# Altium schematic symbol library PCB_PTUMotorDriver.SCHLIB: 144 symbols (part 1 of 3)
Pins are listed as number, name and electrical type; pins without a type are passive.

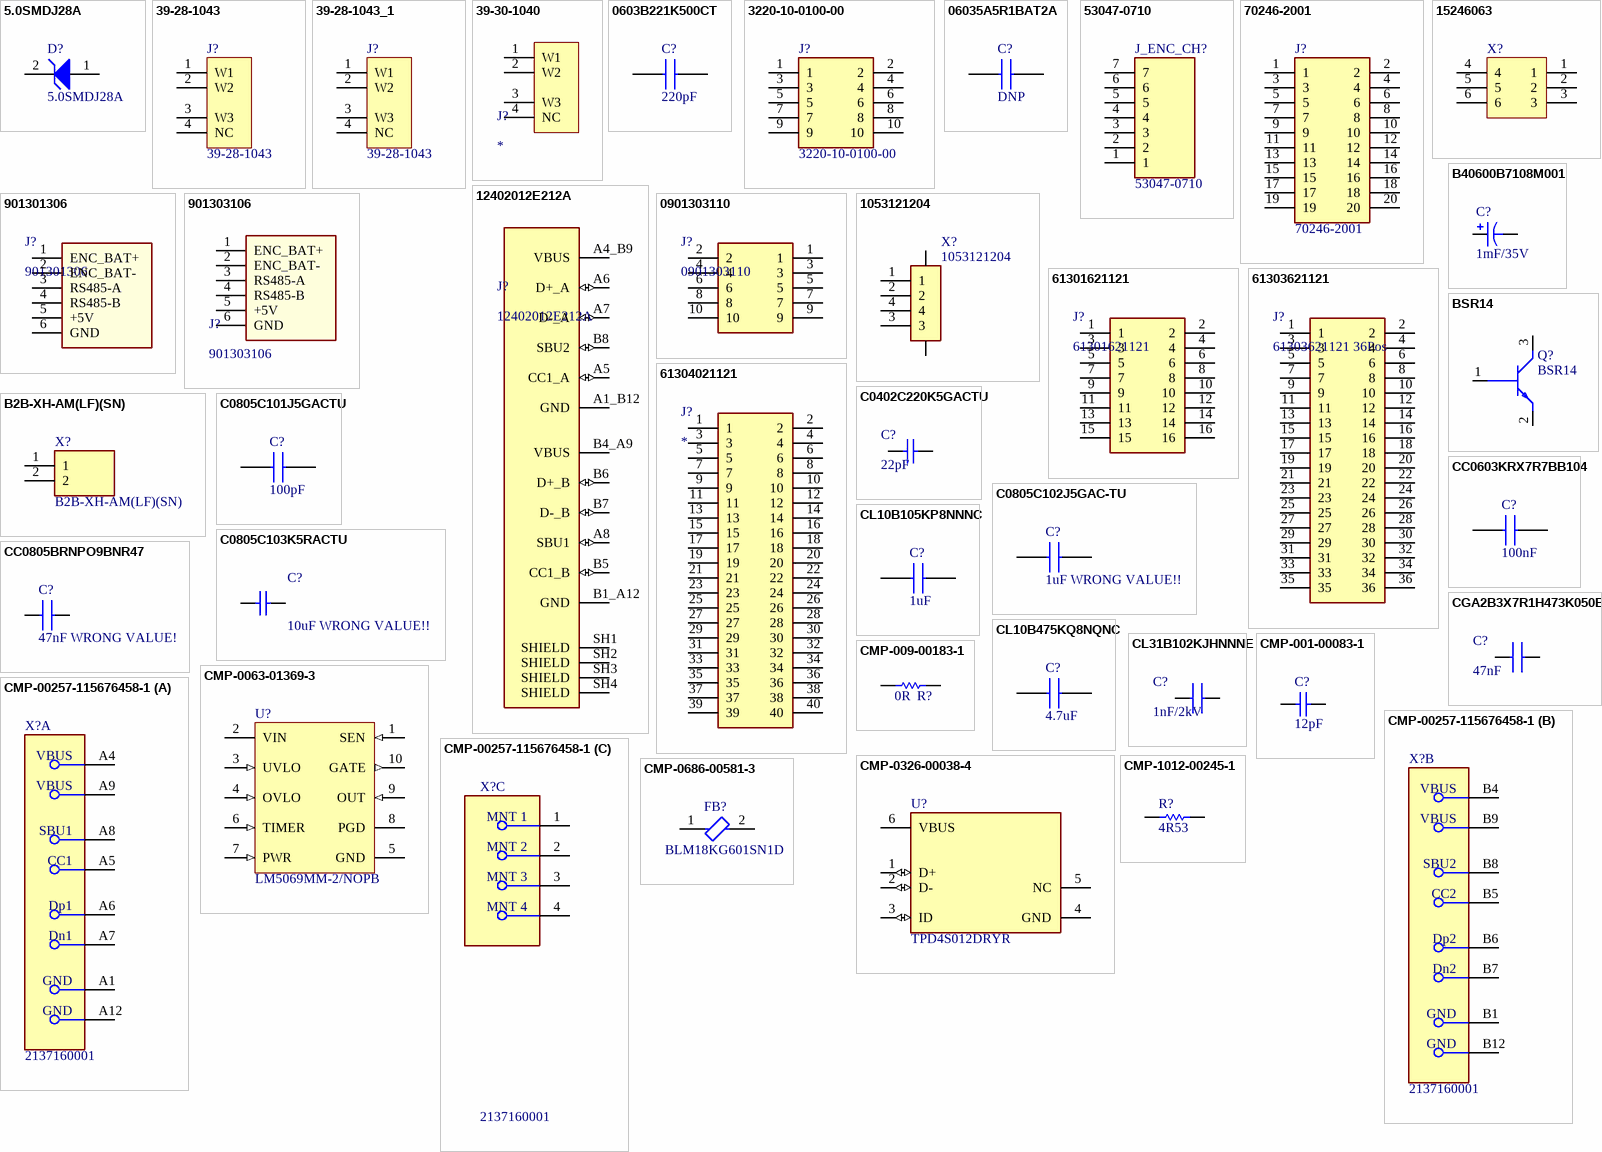
[diagram p0: symbols 5.0SMDJ28A to CMP-1012-00245-1]

## 5.0SMDJ28A
designator D?
5.0SMDJ Series 5 kW 28 V Uni-Directional Surface Mount TVS Diode - DO-214AB; Manufacturer: Littelfuse; ComponentLink1URL: https://datasheet.ciiva.com/15143/getdatasheetpartid-185167-15143888.pdf?src-supplier=Verical; ComponentLink1Description: https://datasheet.ciiva.com/15143/getdatasheetpartid-185167-15143888.pdf?src-supplier=Verical; ComponentLink2URL: https://datasheet.ciiva.com/332/littelfuse-tvs-diode-5-0smdj-datasheet-pdf-332914.pdf?src-supplier=Digikey; ComponentLink2Description: https://datasheet.ciiva.com/332/littelfuse-tvs-diode-5-0smdj-datasheet-pdf-332914.pdf?src-supplier=Digikey; ComponentLink3URL: https://datasheet.ciiva.com/332/littelfuse-tvs-diode-5-0smdj-datasheet-pdf-332915.pdf?src-supplier=Digikey; ComponentLink3Description: https://datasheet.ciiva.com/332/littelfuse-tvs-diode-5-0smdj-datasheet-pdf-332915.pdf?src-supplier=Digikey; ComponentLink4URL: https://datasheet.ciiva.com/332/littelfuse-tvs-diode-5-0smdj-datasheet-pdf-332916.pdf?src-supplier=Digikey; ComponentLink4Description: https://datasheet.ciiva.com/332/littelfuse-tvs-diode-5-0smdj-datasheet-pdf-332916.pdf?src-supplier=Digikey; Supplier: Digikey; Supplier Part Number: 5.0SMDJ28ADKR-ND; Manufacturer Part Number: 5.0SMDJ28A; RoHS: Yes; Category: TVS Diodes; Stock: 6790; Pricing: 1=1.65, 10=1.37, 100=1.0902, 500=0.92246, 1000=0.78269 (USD); Supplier 1: Digikey; Supplier Part Number 1: 5.0SMDJ28ACT-ND
footprint DO-214AB,SMC (DO-214AB)
pins: 1 A, 2 K

## 39-28-1043
designator J?
Connector; Manufacturer_Name: Molex; Datasheet Link: https://www.molex.com/pdm_docs/sd/039281023_sd.pdf; Height: 12.8mm; Manufacturer Part Number: 39-28-1043; Mouser Part Number: 538-39-28-1043; Mouser Price/Stock: https://www.mouser.co.uk/ProductDetail/Molex/39-28-1043?qs=LQQHZ4xw2XCMHoV0KRLGhg%3D%3D; Arrow Part Number: 39-28-1043; Arrow Price/Stock: https://www.arrow.com/en/products/39-28-1043/molex?region=nac; Supplier 1: Mouser; Supplier Part Number 1: 538-39-28-1043; Supplier 2: Digikey; Supplier Part Number 2: WM3801-ND
footprint 39-28-1043
pins: 1 W1, 2 W2, 3 W3, 4 NC

## 39-28-1043_1
designator J?, comment 39-28-1043
Connector Molex; Datasheet Link: https://www.molex.com/pdm_docs/sd/039281023_sd.pdf; Height: 12.8mm; Manufacturer_Name: Molex; Manufacturer Part Number: 39-28-1043; Mouser Part Number: 538-39-28-1043; Mouser Price/Stock: https://www.mouser.co.uk/ProductDetail/Molex/39-28-1043?qs=LQQHZ4xw2XCMHoV0KRLGhg%3D%3D; Arrow Part Number: 39-28-1043; Arrow Price/Stock: https://www.arrow.com/en/products/39-28-1043/molex?region=nac; Supplier 1: Heilind Electronics; Supplier Part Number 1: 5566-04A
footprint 39-28-1043
pins: 1 W1, 2 W2, 3 W3, 4 NC

## 39-30-1040
designator J?
Connector; Manufacturer_Name: Molex; Datasheet Link: https://www.molex.com/pdm_docs/sd/039300020_sd.pdf; Height: 10mm; Manufacturer_Part_Number: 39-30-1040; Mouser Part Number: 538-39-30-1040; Mouser Price/Stock: https://www.mouser.co.uk/ProductDetail/Molex/39-30-1040?qs=tRPrwvvr%2FugKtPXHFlZTbg%3D%3D; Manufacturer Part Number: 39-30-1040
footprint 39-30-104Y
pins: 1 W1, 2 W2, 3 W3, 4 NC

## 0603B221K500CT
designator C?, comment 220pF
Capacitor 220pF 0603; Manufacturer_Name: Walsin Technology Corporation; Manufacturer Part Number: 0603B221K500CT; Datasheet Link: http://www.passivecomponent.com/wp-content/uploads/datasheet/WTC_MLCC_General_Purpose.pdf; Height: 0.87mm; Supplier 1: Digikey; Supplier Part Number 1: 1292-1407-1-ND
footprint CAPC1608X87N
pins: 1, 2

## 3220-10-0100-00
designator J?
Connector; Manufacturer_Name: CNC Tech; Datasheet Link: https://datasheet.datasheetarchive.com/originals/dk/DKDS-7/133059.pdf; Height: 5.6mm; Manufacturer Part Number: 3220-10-0100-00; Arrow Part Number: 3220-10-0100-00; Arrow Price/Stock: https://www.arrow.com/en/products/3220-10-0100-00/cnc-tech-llc?utm_currency=USD&region=nac; Supplier 1: Digikey; Supplier Part Number 1: 1175-1627-ND
footprint 322010010000
pins: 1, 2, 3, 4, 5, 6, 7, 8, 9, 10

## 06035A5R1BAT2A
designator C?, comment DNP
Capacitor 5.1pF 0603; Manufacturer_Name: Kyocera AVX; Manufacturer Part Number: 06035A5R1BAT2A; Datasheet Link: https://componentsearchengine.com/Datasheets/1/06031A100FAT2A.pdf; Height: 0.9mm; Mouser Part Number: 581-06035A5R1BAT2A; Mouser Price/Stock: https://www.mouser.com/Search/Refine.aspx?Keyword=581-06035A5R1BAT2A; Supplier 1: Digikey; Supplier Part Number 1: 478-12709-6-ND
footprint CAPC1608X90N
pins: 1, 2

## 53047-0710
designator J_ENC_CH?
Connector; Manufacturer_Name: Molex; Datasheet Link: https://componentsearchengine.com/Datasheets/2/53047-0710.pdf; Height: 4.4mm; Manufacturer_Part_Number: 53047-0710; Mouser Part Number: 538-53047-0710; Mouser Price/Stock: https://www.mouser.co.uk/ProductDetail/Molex/53047-0710?qs=359VwiUTsp369M2ojInejw%3D%3D; Manufacturer Part Number: 53047-0710
footprint 530470710
pins: 1, 2, 3, 4, 5, 6, 7

## 70246-2001
designator J?
Connector; Manufacturer_Name: Molex; Datasheet Link: https://componentsearchengine.com/Datasheets/2/70246-2001.pdf; Height: 9.47mm; Manufacturer Part Number: 70246-2001; Mouser Part Number: 538-70246-2001; Mouser Price/Stock: https://www.mouser.co.uk/ProductDetail/Molex/70246-2001?qs=L7RdmAxh%252BcMgmUPcB5dMoQ%3D%3D; Supplier 1: Mouser; Supplier Part Number 1: 538-70246-2001
footprint SHDR20W99P254_2X10_3302X889X947P
pins: 1, 2, 3, 4, 5, 6, 7, 8, 9, 10, 11, 12, 13, 14, 15, 16, 17, 18, 19, 20

## 12402012E212A
designator J?
USB2.0, Type C, Top mount, CH 1.68mm, Dual Row SMT; MF: Amphenol ICC (Commercial Products); MP: 12402012E212A; Price: None; Package: None; Availability: In Stock; SnapEDA_Link: https://www.snapeda.com/parts/12402012E212A/Amphenol/view-part/?ref=snap; Value: *; Check_prices: https://www.snapeda.com/parts/12402012E212A/Amphenol/view-part/?ref=eda; Purchase-URL: https://pricing.snapeda.com/search/part/12402012E212A/?ref=eda; Supplier 1: Digikey; Supplier Part Number 1: 664-12402012E212ACT-ND; Manufacturer Part Number: 12402012E212A
footprint AMPHENOL_12402012E212A
pins: A1_B12 GND (power), A4_B9 VBUS (power), A5 CC1_A (io), A6 D+_A (io), A7 D-_A (io), A8 SBU1 (io), B1_A12 GND (power), B4_A9 VBUS (power), B5 CC1_B (io), B6 D+_B (io), B7 D-_B (io), B8 SBU2 (io), SH1 SHIELD, SH2 SHIELD, SH3 SHIELD, SH4 SHIELD

## 15246063
designator X?
Conn Power HDR 6 POS 4.2mm Solder RA Thru-Hole 6 Terminal 1 Port Mini-Fit® BMI Frame; Manufacturer: Molex; Supplier: Digikey; Supplier Part Number: WM13414-ND; Manufacturer Part Number: 15-24-6063; RoHS: Yes; Category: Headers and Wire Housings; Stock: 3219; Pricing: 1=2.18, 10=1.918, 100=1.5346 (USD); ComponentLink1URL: https://datasheet.ciiva.com/6814/015246180-sd-6814098.pdf?src-supplier=Digikey; ComponentLink1Description: https://datasheet.ciiva.com/6814/015246180-sd-6814098.pdf?src-supplier=Digikey; ComponentLink2URL: https://datasheet.ciiva.com/36533/88630015246063-pcb-headers-36533167.pdf?src-supplier=Onlinecomponents.com; ComponentLink2Description: https://datasheet.ciiva.com/36533/88630015246063-pcb-headers-36533167.pdf?src-supplier=Onlinecomponents.com; ComponentLink3URL: https://datasheet.ciiva.com/3117/0015246063-pcb-headers-3117083.pdf?src-supplier=Avnet; ComponentLink3Description: https://datasheet.ciiva.com/3117/0015246063-pcb-headers-3117083.pdf?src-supplier=Avnet; Supplier 1: Mouser; Supplier Part Number 1: 538-15-24-6063
footprint MOLEX_15246063
pins: 1, 2, 3, 4, 5, 6

## 901301306
designator J?
C-Grid III Header, Dual Row, Vertical, Shrouded, Fully Loaded, 6 Circuits, Black, 0.76Âµm Gold (Au) Selective Plating; Manufacturer_Name: Molex Connector Corporation; Copyright: Copyright (C) 2025 Ultra Librarian. All rights reserved.; Manufacturer_Part_Number: 901301306; Datasheet: https://www.molex.com/en-us/products/part-detail-pdf/901301306?display=pdf; RefDes: RefDes; Type: Type; Manufacturer Part Number: 901301306
footprint CONN06_901301306_MOL
pins: 1 ENC_BAT+, 2 ENC_BAT-, 3 RS485-A, 4 RS485-B, 5 +5V, 6 GND

## 901303106
designator J?
C-Grid III Header, Dual Row, RIGHT ANGLE, Shrouded, Fully Loaded, 6 Circuits, Black, 0.76Âµm Gold (Au) Selective Plating; Manufacturer_Name: Molex; Datasheet Link: https://www.molex.com/pdm_docs/sd/901303106_sd.pdf; Height: 10.05mm; Manufacturer Part Number: 901303106
footprint 901303106
pins: 1 ENC_BAT+, 2 ENC_BAT-, 3 RS485-A, 4 RS485-B, 5 +5V, 6 GND

## 0901303110
designator J?
10pin C-Grid III Header, Dual Row, RIGHT ANGLE, Shrouded, Fully Loaded, 6 Circuits, Black, 0.76Âµm Gold (Au) Selective Plating; Manufacturer_Name: Molex; Datasheet Link: https://www.molex.com/content/dam/molex/molex-dot-com/products/automated/en-us/salesdrawingpdf/901/90130/901303110_sd.pdf; Height: 10.05mm; Manufacturer_Part_Number: 0901303110; Mouser Part Number: N/A; Mouser Price/Stock: https://www.mouser.co.uk/ProductDetail/Molex/0901303110?qs=PBcRNPEHKspGtgy5h3rWFw%3D%3D; Arrow Part Number: 0901303110; Arrow Price/Stock: https://www.arrow.com/en/products/0901303110/molex; Manufacturer Part Number: 0901303110
footprint 0901303110
pins: 1, 2, 3, 4, 5, 6, 7, 8, 9, 10

## 1053121204
designator X?
Connector; Manufacturer: Molex; Datasheet Link: https://www.molex.com/pdm_docs/sd/1053121104_sd.pdf; Height: 10.51mm; Manufacturer Part Number: 1053121204; Supplier 1: Mouser; Supplier Part Number 1: 538-105312-1204
footprint 1053121204
pins: 1, 2, 3, 4, P1, P2

## 61301621121
designator J?
Connector 16pos; Manufacturer_Name: Wurth Elektronik; Datasheet Link: https://www.we-online.de/catalog/datasheet/61301621121.pdf; Height: 8.89mm; Manufacturer Part Number: 61301621121; Mouser Part Number: 710-61301621121; Mouser Price/Stock: https://www.mouser.co.uk/ProductDetail/Wurth-Elektronik/61301621121?qs=PhR8RmCirEZBHI%2Fm2diuGA%3D%3D
footprint HDRV16W64P254X254_2X8_2032X508X889P
pins: 1, 2, 3, 4, 5, 6, 7, 8, 9, 10, 11, 12, 13, 14, 15, 16

## 61303621121
designator J?, comment 61303621121 36Pos
Connector Male Jumper 36POS; Manufacturer_Name: Wurth Elektronik; Datasheet Link: https://componentsearchengine.com/Datasheets/2/61303621121.pdf; Height: 8.69mm; Manufacturer Part Number: 61303621121; Mouser Part Number: 710-61303621121; Mouser Price/Stock: https://www.mouser.co.uk/ProductDetail/Wurth-Elektronik/61303621121?qs=PhR8RmCirEbX4NHfZ5nFxQ%3D%3D
footprint HDRV36W64P254_2X18_4572X508X869P
pins: 1, 2, 3, 4, 5, 6, 7, 8, 9, 10, 11, 12, 13, 14, 15, 16, 17, 18, 19, 20, 21, 22, 23, 24, 25, 26, 27, 28, 29, 30, 31, 32, 33, 34, 35, 36

## 61304021121
designator J?
Connector; Manufacturer_Name: Wurth Elektronik; Manufacturer Part Number: 61304021121; Datasheet Link: https://katalog.we-online.com/em/datasheet/6130xx21121.pdf; Height: 8.69mm; Mouser Part Number: 710-61304021121; Mouser Price/Stock: https://www.mouser.co.uk/ProductDetail/Wurth-Elektronik/61304021121?qs=PhR8RmCirEYWKI5WqdDUyg%3D%3D
footprint HDRV40W64P254X254_2X20_5080X508X869P
pins: 1, 2, 3, 4, 5, 6, 7, 8, 9, 10, 11, 12, 13, 14, 15, 16, 17, 18, 19, 20, 21, 22, 23, 24, 25, 26, 27, 28, 29, 30, 31, 32, 33, 34, 35, 36, 37, 38, 39, 40

## B2B-XH-AM(LF)(SN)
designator X?
Conn Shrouded Header (4 Sides) HDR 2 POS 2.5mm Solder ST Top Entry Thru-Hole Box; Manufacture: JST; Number of Contacts: 2NUMBER; Datasheet Link: https://www.jst-mfg.com/product/pdf/eng/eXH.pdf; Height: 7mm; Manufacturer Part Number: B2B-XH-AM(LF)(SN); Arrow Part Number: B2B-XH-AM(LF)(SN); Arrow Price/Stock: https://www.arrow.com/en/products/b2b-xh-am-lf-sn/jst-manufacturing?region=europe; Supplier: Arrow Electronics; Supplier Part Number: B2B-XH-AM(LF)(SN); Manufacturer: JST; RoHS: Yes; Category: Headers and Wire Housings; Stock: 14850; Pricing: 1=0.1714, 10=0.1357, 25=0.1343, 50=0.133, 100=0.0802, 1000=0.0554 (USD); Lead Free: 5697LeadFree; ComponentLink1URL: https://datasheet.ciiva.com/26894/getdatasheetpartid-640409-26894436.pdf?src-supplier=Verical; ComponentLink1Description: https://datasheet.ciiva.com/26894/getdatasheetpartid-640409-26894436.pdf?src-supplier=Verical; ComponentLink2URL: https://datasheet.ciiva.com/14800/exh-14800590.pdf?src-supplier=Digikey; ComponentLink2Description: https://datasheet.ciiva.com/14800/exh-14800590.pdf?src-supplier=Digikey; Supplier 1: Mouser; Supplier Part Number 1: 306-B2B-XH-AMLFSNP
footprint B2BXHAMLFSN
pins: 1, 2

## B40600B7108M001
designator C?, comment 1mF/35V
Capacitor 1000µF/35V DC, 16mm dia x 25mm length; Manufacturer: TDK EPCOS; MP: B40600B7108M001; Value: 1000uF; MF: EPCOS - TDK Electronics; SnapEDA_Link: https://www.snapeda.com/parts/B40600B7108M001/TDK/view-part/?ref=snap; Purchase-URL: https://pricing.snapeda.com/search/part/B40600B7108M001/?ref=eda; Check_prices: https://www.snapeda.com/parts/B40600B7108M001/TDK/view-part/?ref=eda; Digi-Key_Part_Number: 495-B40600B7108M001-ND; Package: AXIAL-2 TDK; Supplier: Digikey; Supplier Part Number: 495-B40600B7108M001-ND; Manufacturer Part Number: B40600B7108M001; RoHS: Yes; Category: Polymer Capacitors; Stock: 816; Pricing: 1=5.06, 10=4.354, 50=3.9488, 180=3.26022, 540=2.835, 1080=2.8125 (USD); Length: 25mm; Supplier 1: Mouser; Supplier Part Number 1: 871-B40600B7108M001
footprint CAP_B40600B7108M001
pins: N, P

## BSR14
designator Q?
Transistor BJT NPN; Manufacturer_Name: Nexperia; Datasheet Link: https://datasheet.datasheetarchive.com/originals/distributors/Datasheets-20/DSA-383686.pdf; Height: 1.1mm; Manufacturer Part Number: BSR14; Mouser Part Number: N/A; Mouser Price/Stock: https://www.mouser.com/Search/Refine.aspx?Keyword=N%2FA; Supplier 1: Digikey; Supplier Part Number 1: 1727-4933-1-ND
footprint TL431CDBZR215
pins: 1 B, 2 E, 3 C

## C0402C220K5GACTU
designator C?, comment 22pF
Capacitor 22pF 0402; Manufacturer_Name: KEMET; Manufacturer Part Number: C0402C220K5GACTU; Datasheet Link: https://content.kemet.com/datasheets/KEM_C1002_X7R_SMD.pdf; Height: 0.55mm; Mouser Part Number: 80-C0402C220K5G; Mouser Price/Stock: https://www.mouser.co.uk/ProductDetail/KEMET/C0402C220K5GACTU?qs=6dm3P68XlMDqaWSnHxY69A%3D%3D; Arrow Part Number: C0402C220K5GACTU; Arrow Price/Stock: https://www.arrow.com/en/products/c0402c220k5gactu/kemet-corporation?region=nac
footprint C0402C104J4RACTU
pins: 1, 2

## C0805C101J5GACTU
designator C?, comment 100pF
Capacitor 100pF 0805; Manufacturer_Name: KEMET; Manufacturer Part Number: C0805C101J5GACTU; Datasheet Link: https://content.kemet.com/datasheets/KEM_C1003_C0G_SMD.pdf; Height: 1.1mm; Mouser Part Number: 80-C0805C101J5G; Mouser Price/Stock: https://www.mouser.co.uk/ProductDetail/KEMET/C0805C101J5GACTU?qs=6pfgPk%252B7Yz7wCPQSSQ%2FBjg%3D%3D; Arrow Part Number: C0805C101J5GACTU; Arrow Price/Stock: https://www.arrow.com/en/products/c0805c101j5gactu/kemet-corporation; Supplier 1: Mouser; Supplier Part Number 1: 80-C0805C101J5G
footprint C0805
pins: 1, 2

## C0805C102J5GAC-TU
designator C?, comment 1uF WRONG VALUE!!
Capacitor 1000pF 0805; Manufacturer_Name: KEMET; Manufacturer Part Number: C0805C102J5GAC-TU; Datasheet Link: https://www.kemet.com/specsheet/C0805C102J5GACTU; Height: 0.88mm; Arrow Part Number: C0805C102J5GAC-TU; Arrow Price/Stock: https://www.arrow.com/en/products/c0805c102j5gactu/kemet-corporation; Supplier 1: Mouser; Supplier Part Number 1: 80-C0805C102J5G
footprint CAPC2012X88N
pins: 1, 2

## C0805C103K5RACTU
designator C?, comment 10uF WRONG VALUE!!
Capacitor 0.01uF 0805; Manufacturer_Name: KEMET; Manufacturer Part Number: C0805C103K5RACTU; Datasheet Link: https://content.kemet.com/datasheets/KEM_C1002_X7R_SMD.pdf; Height: 1.1mm; Mouser Part Number: 80-C0805C103K5R; Mouser Price/Stock: https://www.mouser.co.uk/ProductDetail/KEMET/C0805C103K5RACTU?qs=cw4evkOYbeJ17Si5k%2FymvA%3D%3D; Arrow Part Number: C0805C103K5RACTU; Arrow Price/Stock: https://www.arrow.com/en/products/c0805c103k5ractu/kemet-corporation?region=nac; Supplier 1: Mouser; Supplier Part Number 1: 80-C0805C103K5R
footprint C0805
pins: 1, 2

## CC0603KRX7R7BB104
designator C?, comment 100nF
Capacitor 100nF 0603; Manufacturer_Name: YAGEO; Manufacturer Part Number: CC0603KRX7R7BB104; Datasheet Link: https://www.yageo.com/en/Chart/Download/pdf/CC0603KRX7R7BB104; Height: 0.9mm; Mouser Part Number: 603-CC603KRX7R7BB104; Mouser Price/Stock: https://www.mouser.co.uk/ProductDetail/YAGEO/CC0603KRX7R7BB104?qs=AgBp2OyFlx8KPmNTlFoWXA%3D%3D; Arrow Part Number: CC0603KRX7R7BB104; Arrow Price/Stock: https://www.arrow.com/en/products/cc0603krx7r7bb104/yageo?utm_currency=USD&region=europe; Supplier 1: Mouser; Supplier Part Number 1: 603-CC603KRX7R7BB104
footprint CAPC1608X90N
pins: 1, 2

## CC0805BRNPO9BNR47
designator C?, comment 47nF WRONG VALUE!
Capacitor  0.47pF 0805; Manufacturer_Name: YAGEO; Manufacturer Part Number: CC0805BRNPO9BNR47; Datasheet Link: https://www.mouser.in/ProductDetail/YAGEO/CC0805BRNPO9BNR47?qs=7s%252B3O6pAiyAZbPSWuoMBdQ%3D%3D; Height: 0.7mm; Mouser Part Number: 603-CC805BRNPO9BNR47; Mouser Price/Stock: https://www.mouser.co.uk/ProductDetail/YAGEO/CC0805BRNPO9BNR47?qs=7s%252B3O6pAiyAZbPSWuoMBdQ%3D%3D; Supplier 1: Digikey; Supplier Part Number 1: 13-CC0805BRNPO9BNR47CT-ND
footprint CAPC2012X70N
pins: 1, 2

## CGA2B3X7R1H473K050BB
designator C?, comment 47nF
Capacitor 47nF 0402; Manufacturer_Name: TDK; Manufacturer Part Number: CGA2B3X7R1H473K050BB; Datasheet Link: http://docs-europe.electrocomponents.com/webdocs/14e9/0900766b814e9125.pdf; Height: 0.55mm; Mouser Part Number: 810-CGA2B3X7R1H473K; Mouser Price/Stock: https://www.mouser.co.uk/ProductDetail/TDK/CGA2B3X7R1H473K050BB?qs=NRhsANhppD9aakaHtKGsyA%3D%3D; Arrow Part Number: CGA2B3X7R1H473K050BB; Arrow Price/Stock: https://www.arrow.com/en/products/cga2b3x7r1h473k050bb/tdk
footprint CAPC1005X55N
pins: 1, 2

## CL10B105KP8NNNC
designator C?, comment 1uF
Capacitor 1uF 0603; Manufacturer_Name: SAMSUNG; Manufacturer Part Number: CL10B105KP8NNNC; Datasheet Link: https://media.digikey.com/pdf/Data%20Sheets/Samsung%20PDFs/CL_Series_MLCC_ds.pdf; Height: 0.9mm; Mouser Part Number: 187-CL10B105KP8NNNC; Mouser Price/Stock: https://www.mouser.co.uk/ProductDetail/Samsung-Electro-Mechanics/CL10B105KP8NNNC?qs=X6jEic%2FHinD9krOsbkFZow%3D%3D; Arrow Part Number: CL10B105KP8NNNC; Arrow Price/Stock: https://www.arrow.com/en/products/cl10b105kp8nnnc/samsung-electro-mechanics?region=europe; Supplier 1: Digikey; Supplier Part Number 1: 1276-1946-1-ND
footprint CAPC1608X90N
footprint Model Name (Model Description)
pins: 1, 2

## CL10B475KQ8NQNC
designator C?, comment 4.7uF
Capacitor 4.7uF 0603; Manufacturer_Name: SAMSUNG; Manufacturer Part Number: CL10B475KQ8NQNC; Datasheet Link: https://datasheet.datasheetarchive.com/originals/distributors/Datasheets-DGA10/2410603.pdf; Height: 0.95mm; Mouser Part Number: 187-CL10B475KQ8NQNC; Mouser Price/Stock: https://www.mouser.co.uk/ProductDetail/Samsung-Electro-Mechanics/CL10B475KQ8NQNC?qs=6tbHoouHnQxd6rcaSwpT7Q%3D%3D; Arrow Part Number: CL10B475KQ8NQNC; Arrow Price/Stock: https://www.arrow.com/en/products/cl10b475kq8nqnc/samsung-electro-mechanics; Supplier 1: Digikey; Supplier Part Number 1: 1276-2087-1-ND
footprint CAPC1608X95N
pins: 1, 2

## CL31B102KJHNNNE
designator C?, comment 1nF/2kV
Capacitor 1nF/2kV 3216 Isolated GND Loop Cap; Manufacturer_Name: SAMSUNG; Manufacturer Part Number: CL31B102KJHNNNE; Datasheet Link: https://www.tme.com/Document/4a42202b32dab16128fe107dd69598cc/samsung-chip-cap.pdf; Height: 1.8mm; Mouser Part Number: 187-CL31B102KJHNNNE; Mouser Price/Stock: https://www.mouser.co.uk/ProductDetail/Samsung-Electro-Mechanics/CL31B102KJHNNNE?qs=X6jEic%2FHinAYVHtIjHgytw%3D%3D; Arrow Part Number: CL31B102KJHNNNE; Arrow Price/Stock: https://www.arrow.com/en/products/cl31b102kjhnnne/samsung-electro-mechanics?utm_currency=USD&region=nac; Supplier 1: DigiKey; Supplier Part Number 1: 1276-3073-1-ND
footprint CAPC3216X180N
pins: 1, 2

## CMP-001-00083-1
designator C?, comment value 12pF  (hidden comment: 12pF_GRM1555C1H120GA01D)
Capacitor 12pF 0402; Manufacturer: Murata; Capacitor Type: Ceramic; Max Operating Temperature: 125°C; Min Operating Temperature: -55°C; Pins: 2; Case/Package: 0402; RoHS Compliant: Yes; Mounting Technology: Surface Mount; Manufacturer Part Number: GRM1555C1H120GA01D; Component Type: Capacitors; Supplier 1: Mouser; Supplier Part Number 1: 81-GRM1555C1H120GA1D
footprint FP-GRM155-0_05-IPC_A
footprint FP-GRM155-0_05-IPC_C
footprint FP-GRM155-0_05-MFG
footprint FP-GRM155-0_05-IPC_B
pins: 1, 2

## CMP-009-00183-1
designator R?, comment 0R
Resistor 0R 0402; Manufacturer: Vishay Dale; Manufacturer Part Number: CRCW04020000Z0EDHP; Power: 200mW; Min Operating Temperature: -55°C; Pins: 2; Case/Package: 0402; Mounting Technology: Surface Mount; Max Operating Temperature: 155°C; RoHS Compliant: Yes; Component Type: Resistors; Supplier 1: Digikey; Supplier Part Number 1: 541-0.0YBCT-ND; Value: 0R
footprint RESC1005X40X25NL05T10 (Chip Resistor, 2-Leads, Body 1.00x0.50mm, IPC Medium Density)
footprint RESC1005X40X25LL05T10 (Chip Resistor, 2-Leads, Body 1.00x0.50mm, IPC High Density)
footprint RESC1005X40X25ML05T10 (Chip Resistor, 2-Leads, Body 1.00x0.50mm, IPC Low Density)
pins: 1, 2
1 alternate drawing of the same symbol

## CMP-0063-01369-3
designator U?, comment LM5069MM-2/NOPB
Positive High Voltage Hot Swap / Inrush Current Controller with Power Limiting, 10-pin MSOP, Pb-Free; Manufacturer: Texas Instruments; PowerWise: N; PackageTopMarking: ZXTT*SNBB; CompType: MiscPower; PackageReference: DGS0010A; PackageDescription: Mini-SO, Molded, .118 x .118 x .034in Body, 10 Lead, .0197in Pitch; Code_JEDEC: MO-187-BA; ComponentLink1URL: http://www.ti.com/general/docs/lit/getliterature.tsp?genericPartNumber=LM5069&fileType=pdf; PinCount: 10; RoHS: Y; ComponentLink1Description: Datasheet URL; Manufacturer Part Number: LM5069MM-2/NOPB
footprint DGS0010A_L (SOP, 10-Leads, Body 3.1x3.1mm, Pitch 0.5mm, IPC High Density)
footprint DGS0010A_M (SOP, 10-Leads, Body 3.1x3.1mm, Pitch 0.5mm, IPC Low Density)
footprint DGS0010A_N (SOP, 10-Leads, Body 3.1x3.1mm, Pitch 0.5mm, IPC Medium Density)
pins: 1 SEN (in), 2 VIN (power), 3 UVLO (in), 4 OVLO (in), 5 GND (power), 6 TIMER (in), 7 PWR (in), 8 PGD (oc), 9 OUT (in), 10 GATE (out)

## CMP-00257-115676458-1
designator X?, comment 2137160001
2137160001 Conn USB 2.0 Type C F 16 POS 0.85mm Solder RA Thru-Hole 16 Terminal 1 Port T/R; NexarPartId: 115676458; Manufacturer: Molex; Number of Contacts: 16; Voltage Rating: 30V; USB Standard: USB 2.0; Height: 3.46mm; Min Operating Temperature: -30°C; Max Operating Temperature: 85°C; Schedule B: 8536695050; Contact Material: Gold, Nickel; Supplier: Digikey; Supplier Part Number: 900-2137160001CT-ND; Manufacturer Part Number: 2137160001; RoHS: No; Category: Connectors; Stock: 10467; Pricing: 1=1.29, 10=1.067, 100=0.8892 (USD)
footprint FP-2137160001-MFG (Conn USB 2.0 Type C F 16 POS 0.85mm Solder RA Thru-Hole 16 Terminal 1 Port T/R)
part A pins: A1 GND, A4 VBUS, A5 CC1, A6 Dp1, A7 Dn1, A8 SBU1, A9 VBUS, A12 GND
part B pins: B1 GND, B4 VBUS, B5 CC2, B6 Dp2, B7 Dn2, B8 SBU2, B9 VBUS, B12 GND
part C pins: 1 MNT 1, 2 MNT 2, 3 MNT 3, 4 MNT 4

## CMP-0326-00038-4
designator U?, comment TPD4S012DRYR
TVS DIODE 5.5V 6SON; Breakdown Voltage: 24V; Interface: USB; ESD Protection: Yes; Peak Pulse Power: 60W; Number of Circuits: 4; Polarity: Unidirectional; Capacitance: 15pF; Test Current: 1mA; Working Voltage: 19V; Min Breakdown Voltage: 6V; Peak Pulse Current: 3A; Operating Supply Voltage: 950mV; Max Operating Temperature: 85°C; Packaging: Tape and Reel; Termination: SMD/SMT; Number of Pins: 6; Radiation Hardening: No; Width: 1.05mm; REACH SVHC: No SVHC; Lead Free: Lead Free; Depth: 1mm; Package Quantity: 5000; Length: 1.45mm; Direction: Unidirectional; Min Operating Temperature: -40°C; Number of Channels: 4; Max Power Dissipation: 60W; Height: 0.55mm; Manufacturer Part Number: TPD4S012DRYR
footprint FP-DRY0006A-MFG
pins: 1 D+ (io), 2 D- (io), 3 ID (io), 4 GND (power), 5 NC, 6 VBUS

## CMP-0686-00581-3
designator FB?, comment BLM18KG601SN1D
Chip Ferrite Bead, 0603, 600Ω @ 100MHz, 0.15Ω, 25%, 1.3A; Material: Steel; Number of Lines: 1; Impedance: 600R; DC Resistance (DCR): 150mR; Tolerance: 25%; Case Code (Metric): 1608; Width: 0.8mm; DC Current: 1.3A; Max DC Current: 1.3A; Package Quantity: 1; Number of Pins: 2; Military Standard: Not; RoHS Compliant: Yes; Termination: SMD/SMT; Max Operating Temperature: 125°C; Length: 1.6mm; Depth: 0.8mm; Case Code (Imperial): 0603; Series: BLM18K; Inductor Type: FERRITE BEAD; Core Material: Ferrite; Number of Circuits: 1; Height: 0.8mm; Case/Package: 0603; REACH SVHC: No SVHC; Packaging: Tape and Reel; Min Operating Temperature: -55°C; Max Current Rating: 1.3A; Radiation Hardening: No; Current Rating: 1.3A; Lead Free: Lead Free; Test Frequency: 100MHz; Weight: 7.1E-05oz; Manufacturer Part Number: BLM18KG601SN1D; Supplier 1: Digikey; Supplier Part Number 1: 490-5258-1-ND
footprint FP-BLM18-0_15-t0_8-IPC_A
footprint FP-BLM18-0_15-t0_8-MFG
footprint FP-BLM18-0_15-t0_8-IPC_B
footprint FP-BLM18-0_15-t0_8-IPC_C
pins: 1, 2

## CMP-1012-00245-1
designator R?, comment 4R53
Resistor 4R53 0603; Manufacturer Part Number: RC0603FR-074R53L; Value: 4.53 Ohm; Case-Metric: 1608; Case-EIA: 0603; Power: 0.1 W; Tolerance: 1 %; Technology: SMT
footprint RESC0603(1608)_L (Chip Resistor, Body 1.6x0.8mm, IPC High Density)
footprint RESC0603(1608)_N (Chip Resistor, Body 1.6x0.8mm, IPC Medium Density)
footprint RESC0603(1608)_M (Chip Resistor, Body 1.6x0.8mm, IPC Low Density)
pins: 1, 2
1 alternate drawing of the same symbol

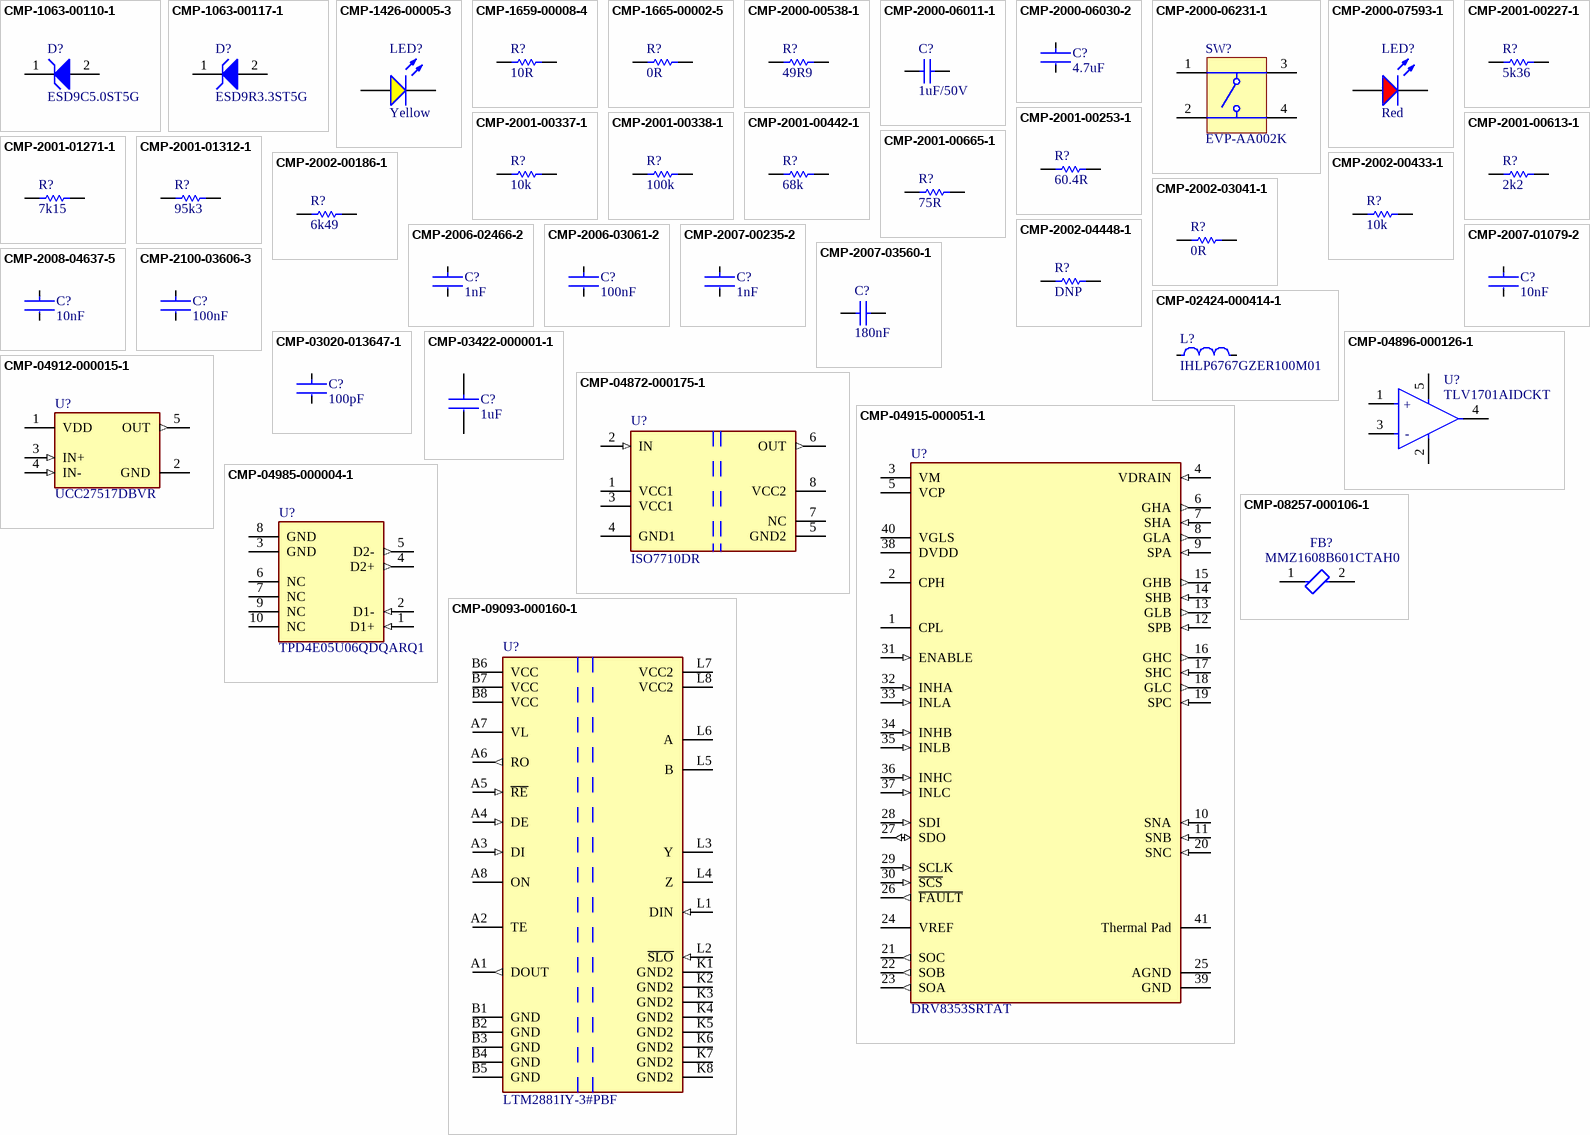
[diagram p1: symbols CMP-1063-00110-1 to CMP-09093-000160-1]

## CMP-1063-00110-1
designator D?, comment ESD9C5.0ST5G
Transient Voltage Suppressor, Micro-Packaged Diode for ESD Protection, 2-Pin SOD-923, Pb-Free, Tape and Reel; Manufacturer: On Semiconductor; C Max (pF): 6.2; Number of Lines: 1; Direction: Unidirectional; IR Max (uA): 0.5; V(BR) Min (V): 11; VRWM Max (V): 5; Diode Element Material: SILICON; Package Body Material: Plastic; Min Breakdown Voltage: 11V; Diode Type: TRANS VOLTAGE SUPPRESSOR; Rep Pk Reverse Voltage-Max: 5V; Time @ Peak Reflow Temperature-Max (s): 40s; Max Power Dissipation: 150mW; Reference Standard: AEC-Q101; Qualification Status: Not Qualified; DatasheetVersion: Rev. 3; Mounting Technology: Surface Mount; PackageReference: SOD-923-2-514AB-01; ComponentLink2Description: Datasheet; PackageVersion: Rev. C, 03/2011; ComponentLink2URL: http://www.onsemi.cn/pub_link/Collateral/ESD9C3.3S-D.PDF; ComponentLink3Description: Package Specification; PartNumber: ESD9C5.0ST5G; ComponentLink1Description: Manufacturer URL; ComponentLink1URL: http://www.onsemi.com/; PackageDescription: 2-Pin SOD, Body 0.8 x 0.6 mm; ComponentLink3URL: http://www.onsemi.com/pub_link/Collateral/514AB.PDF; Packing: Tape and Reel; RoHS: Pb-Free; Supplier 1: Digi-Key; Supplier Part Number 1: ESD9C5.0ST5GOSDKR-ND; Manufacturer Part Number: ESD9C5.0ST5G; Category: ESD and Circuit Protection ICs; Stock 1: 345553; Pricing 1: 1=0.38000, 10=0.30900, 100=0.16370, 500=0.10772, 1000=0.07325, 2000=0.06607 (USD); Number of Pins: 2; Package Shape: Rectangular; Terminal Finish: Tin; Min Operating Temperature: -55°C; Max Operating Temperature: 150°C; JESD-609 Code: e3; Polarity: Unidirectional; JESD-30 Code: R-PDSO-F2; Moisture Sensitivity Level: 1; Number of Elements: 1; Package Style: SMALL OUTLINEMeter; Surface Mount: Yes; Technology: AVALANCHE; Terminal Form: Flat; Terminal Position: DUAL; Peak Reflow Temperature (Cel): 260°C; REACH SVHC: Yes; RoHS Compliant: Yes; ComponentLink4URL: https://datasheet.ciiva.com:443/pdfs/VipMasterIC/IC/ONSM/ONSM-S-A0003514262/ONSM-S-A0003579756-1.pdf?src-supplier=IHS+Markit; ComponentLink4Description: https://datasheet.ciiva.com:443/pdfs/VipMasterIC/IC/ONSM/ONSM-S-A0003514262/ONSM-S-A0003579756-1.pdf?src-supplier=IHS+Markit; ComponentLink5URL: https://datasheet.ciiva.com/1219/1748974-1219321.pdf?src-supplier=Newark; ComponentLink5Description: https://datasheet.ciiva.com/1219/1748974-1219321.pdf?src-supplier=Newark; ComponentLink6URL: https://datasheet.ciiva.com/4509/esd9c3-3s-d-241629-4509822.pdf?src-supplier=Mouser; ComponentLink6Description: https://datasheet.ciiva.com/4509/esd9c3-3s-d-241629-4509822.pdf?src-supplier=Mouser; ComponentLink7URL: https://datasheet.ciiva.com/15143/getdatasheetpartid-53763-15143125.pdf?src-supplier=Verical; ComponentLink7Description: https://datasheet.ciiva.com/15143/getdatasheetpartid-53763-15143125.pdf?src-supplier=Verical; ComponentLink8URL: https://datasheet.ciiva.com/339/esd9c3-3s-d-339778.pdf?src-supplier=Digi-Key; ComponentLink8Description: https://datasheet.ciiva.com/339/esd9c3-3s-d-339778.pdf?src-supplier=Digi-Key; ComponentLink9URL: https://datasheet.ciiva.com/11195/esd9c3-3s-d-11195341.pdf?src-supplier=Avnet; ComponentLink9Description: https://datasheet.ciiva.com/11195/esd9c3-3s-d-11195341.pdf?src-supplier=Avnet; ComponentLink10URL: https://datasheet.ciiva.com/339/esd9c3-3s-d-339779.pdf?src-supplier=Digi-Key; ComponentLink10Description: https://datasheet.ciiva.com/339/esd9c3-3s-d-339779.pdf?src-supplier=Digi-Key; ComponentLink11URL: https://datasheet.ciiva.com/339/esd9c3-3s-d-339780.pdf?src-supplier=Digi-Key; ComponentLink11Description: https://datasheet.ciiva.com/339/esd9c3-3s-d-339780.pdf?src-supplier=Digi-Key
footprint ONSC-SOD-923-2-514AB-01_V (SOD, 2-Leads, Body 0.8x0.6mm)
pins: 1 K, 2 A

## CMP-1063-00117-1
designator D?, comment ESD9R3.3ST5G
Transient Voltage Suppressor, ESD Protection Diode with Ultra-Low Leakage, 2-Pin SOD-923, Pb-Free, Tape and Reel; Manufacturer: On Semiconductor; Manufacturer Part Number: SZESD9R3.3ST5G; C Max (pF): 0.9; V(BR) Min (V): 4.8; Number of Lines: 1; Direction: Unidirectional; IR Max (uA): 0.001; VRWM Max (V): 3.3; Clamping Voltage-Max: 7.8V; Diode Type: TRANS VOLTAGE SUPPRESSOR; Rep Pk Reverse Voltage-Max: 3.3V; Breakdown Voltage-Nom: 4.8V; PackageReference: SOD-923-2-514AB-01; ComponentLink3URL: http://www.onsemi.com/pub_link/Collateral/514AB.PDF; DatasheetVersion: Rev. 1; PackageDescription: 2-Pin SOD, Body 0.8 x 0.6 mm; ComponentLink1URL: http://www.onsemi.com/; ComponentLink2Description: Datasheet; ComponentLink3Description: Package Specification; Packing: Tape and Reel; ComponentLink1Description: Manufacturer URL; ComponentLink2URL: http://www.onsemi.com/pub_link/Collateral/ESD9R3.3S-D.PDF; RoHS: Pb-Free; PackageVersion: Rev. C, 03/2011; Mounting Technology: Surface Mount; PartNumber: ESD9R3.3ST5G; Supplier 1: Digi-Key; Supplier Part Number 1: SZESD9R3.3ST5GOSDKR-ND; Category: ESD and Circuit Protection ICs; Stock 1: 31698; Pricing 1: 1=0.61000, 10=0.52500, 100=0.39180, 500=0.30782, 1000=0.23786, 2000=0.21688 (USD); Terminal Finish: Tin; JESD-609 Code: e3; Polarity: Unidirectional; Moisture Sensitivity Level: 1; Surface Mount: Yes; REACH SVHC: Yes; RoHS Compliant: Yes; ComponentLink4URL: https://datasheet.ciiva.com:443/pdfs/VipMasterIC/IC/ONSM/ONSM-S-A0003514262/ONSM-S-A0003583458-1.pdf?src-supplier=IHS+Markit; ComponentLink4Description: https://datasheet.ciiva.com:443/pdfs/VipMasterIC/IC/ONSM/ONSM-S-A0003514262/ONSM-S-A0003583458-1.pdf?src-supplier=IHS+Markit; ComponentLink5URL: https://datasheet.ciiva.com/24087/esd9r3-3s-d-241663-24087547.pdf?src-supplier=Mouser; ComponentLink5Description: https://datasheet.ciiva.com/24087/esd9r3-3s-d-241663-24087547.pdf?src-supplier=Mouser
footprint ONSC-SOD-923-2-514AB-01_V (SOD, 2-Leads, Body 0.8x0.6mm)
pins: 1 K, 2 A

## CMP-1426-00005-3
designator LED?, comment Yellow
WL-SMCW SMT Mono-Color Chip LED Waterclear; Manufacturer Part Number: 710-150060YS75000; Power Dissipation: 72mW; Reverse Voltage: 5V; Forward Voltage: 2V; Test Current: 20mA; Luminous Intensity: 120mcd; Max Junction Temperature (Tj): 95°C; Wavelength: 590nm; Forward Current: 100mA; Lens Style: Clear, Rectangular; Viewing Angle: 140°; Peak Wavelength: 595nm; Case Code (Metric): 1608; Length: 1.6mm; Max Reverse Voltage (DC): 5V; Case Code (Imperial): 0603; Dominant Wavelength: 590nm; Color: Yellow; Mount: Surface Mount; Max Operating Temperature: 85°C; Min Operating Temperature: -40°C; Packaging: Tape and Reel; REACH SVHC: Unknown; Width: 800µm; Case/Package: 0603; Height: 700µm; RoHS: Compliant; Supplier 1: Mouser
footprint WL-SMCW_0603_150060xx75000 (SMD Mono-color Chip LED, body 1.60 x 0.80 mm)
pins: 1 K, 2 A

## CMP-1659-00008-4
designator R?, comment 10R
Resistor 10R 0603; Manufacturer: Yageo; Manufacturer Part Number: RC0603FR-0710RL; Voltage Rating: 50 V; PackageReference: 0603; ComponentLink3Description: Package Specification; Packaging: Tape and Reel; Max Operating Temperature: 155 degC; ComponentLink3URL: http://www.farnell.com/datasheets/443971.pdf; PackageDescription: 2-Pin Surface Mount Device, Body 1.6 x 0.8 mm; ComponentLink1URL: http://www.yageo.com/; Pins: 2; REACH SVHC: No SVHC; RoHSCompliant: true; ComponentLink2URL: http://www.yageo.com/documents/recent/PYu-RC_Group_51_RoHS_L_04.pdf; DatasheetVersion: Rev. 4, 02/2016; Mount: Surface Mount; Package Quantity: 200; Min Operating Temperature: -55 degC; Height: 0.45 mm; Mounting Technology: Surface Mount; ComponentLink1Description: Manufacturer URL; ComponentLink2Description: Datasheet; Length: 1.6 mm
footprint RESC1608X55X25NL10T15 (Chip Resistor, 2-Leads, Body 1.70x0.90mm, IPC Medium Density)
footprint RESC1608X55X25LL10T15 (Chip Resistor, 2-Leads, Body 1.70x0.90mm, IPC High Density)
footprint RESC1608X55X25ML10T15 (Chip Resistor, 2-Leads, Body 1.70x0.90mm, IPC Low Density)
pins: 1, 2

## CMP-1665-00002-5
designator R?, comment 0R
Resistor 0R 0805; Manufacturer Part Number: ERJ-6GEY0R00V; Tolerance: 5%; Resistance: 0 Ohm; REACH SVHC: No SVHC; Min Operating Temperature: -55 degC; Case/Package: 0805; Packaging: Tape and Reel; Package Quantity: 5000; ComponentLink1Description: Manufacturer URL; PackageDescription: 2-Pin Surface Mount Device, Body 2 x 1.25 mm; Mounting Technology: Surface Mount; Max Operating Temperature: 155 degC; Width: 1.25 mm; RoHSCompliant: True; Height: 0.6 mm; ComponentLink1URL: http://www.panasonic.com/; ComponentLink2URL: http://industrial.panasonic.com/cdbs/www-data/pdf/RDA0000/AOA0000C84.pdf; Case Code (Imperial): 0805; DatasheetVersion: 03/2015; Length: 2 mm; Case Code (Metric): 2012; ComponentLink2Description: Datasheet; Radiation Hardening: No
footprint RESC2013X70X40NL20T20 (Chip Resistor, 2-Leads, Body 2.00x1.25mm, IPC Medium Density)
footprint RESC2013X70X40LL20T20 (Chip Resistor, 2-Leads, Body 2.00x1.25mm, IPC High Density)
footprint RESC2013X70X40ML20T20 (Chip Resistor, 2-Leads, Body 2.00x1.25mm, IPC Low Density)
pins: 1, 2

## CMP-2000-00538-1
designator R?, comment 49R9
Resistor 49R9 0603; Manufacturer: Panasonic; Manufacturer Part Number: ERJ-3EKF49R9V; Supplier 1: Farnell; Supplier Part Number 1: 2059274
footprint RESC1608X55X30ML15T15 (Chip Resistor, 2-Leads, Body 1.60x0.80mm, IPC Low Density)
footprint RESC1608X55X30NL15T15 (Chip Resistor, 2-Leads, Body 1.60x0.80mm, IPC Medium Density)
footprint RESC1608X55X30LL15T15 (Chip Resistor, 2-Leads, Body 1.60x0.80mm, IPC High Density)
pins: 1, 2
1 alternate drawing of the same symbol

## CMP-2000-06011-1
designator C?, comment 1uF/50V
Capacitor 1uF/50V 0801; Manufacturer: Kemet; Manufacturer Part Number: C1206C105K5RACTU; Case Height: 1mm; Dielectric: X7R; Voltage Rating: 50V; Capacitance: 1uF; Temperature Coefficient / Code: +/-15%; Case Length: 3.2mm; Case Width: 1.6mm; Type: SMDMLCCX7R6.3-250VDCCommericalGrade; Tolerance: 10%; Class: Class1; Capacitance - nF: 1000nF; Datasheet URL: http://www.kemet.com/docfinder?Partnumber=C1206C105K5RACTU; Product Category: MultilayerCeramicCapacitorsMLCC-SMD/SMT; Termination Style: SMD/SMT; Dimensions: 1.6mmWx3.2mmLx1mmH; Voltage Rating DC: 50V; Datasheet Version: 02/2016; Packaging: Reel; Brand: Kemet; RoHS: Details; Minimum Operating Temperature: -55C; Operating Temperature Range: -55Cto+125C; Package Reference: 1206; Manufacturer URL: http://www.kemet.com/; Product: GeneralTypeMLCCs; Package Description: 2-Pin Surface Mount Device, Body 3.2 x 1.6 mm; Mounting Technology: SurfaceMount; Case Code - mm: 3216; Maximum Operating Temperature: +125C; Series: C1206C; Factory Pack Quantity: 2500; Package / Case: 1206(3216metric); Case Code - in: 1206; Parameter 2: *; Parameter 3: *; Supplier 1: DigiKey; Supplier Part Number 1: 399-C1206C105K5RACTUTR-ND
footprint CAPC3216X110X50LL20T25 (Chip Capacitor, 2-Leads, Body 3.20x1.60mm, IPC High Density)
footprint CAPC3216X110X50ML20T25 (Chip Capacitor, 2-Leads, Body 3.40x1.80mm, IPC Low Density)
footprint CAPC3216X110X50NL20T25 (Chip Capacitor, 2-Leads, Body 3.40x1.80mm, IPC Medium Density)
pins: 1, 2

## CMP-2000-06030-2
designator C?, comment 4.7uF
Capacitor 4.7uF 0603 - unused; Voltage Rating: 6.3V; Tolerance: 10%; Dielectric: X7S; Dielectric Material: Ceramic; Mount: Surface Mount; Case/Package: 0603; Case Code (Metric): 1608; Case Code (Imperial): 0603; Min Operating Temperature: -55°C; Max Operating Temperature: 125°C; Packaging: Tape and Reel; Length: 1.6mm; Width: 0.8mm; Thickness: 0.035inch; RoHS Compliant: Yes; Capacitance: 4.7uF; Lead Free: Lead Free; Termination: SMD/SMT; Package Quantity: 1; Resistor Type: Ceramic; Height: 0.8mm; Weight: 7.1E-05oz; Series: C; Voltage Rating (DC): 6.3V; Depth: 0.8mm; REACH SVHC: No SVHC
footprint FP-C1608-080-0_1-IPC_A
footprint FP-C1608-080-0_1-IPC_B
footprint FP-C1608-080-0_1-MFG
footprint FP-C1608-080-0_1-IPC_C
pins: 1, 2

## CMP-2000-06231-1
designator SW?, comment EVP-AA002K
Light Touch Switch, 100 mOhm, -40 to 85 degC, 4-Pin SMD, RoHS, Tape and Reel; Manufacturer: Panasonic; Electrical Life: 1000000Cycles; Switch Configuration: N.O.; COO: JP; Actuator Color: Black; Contact Rating @ Voltage: 0.02@1+5VDCA; Dielectric Strength: 250VAC; Actuator Length: 0.3mm; Ground Terminal: No; Operating Force: 1N; Pole Throw Configuration: SPST; Body Orientation: Straight; Illumination Type: N/R; Maximum DC Voltage Rating: 1+5V; Actuator Style: RectangularButton; Maximum AC Voltage Rating: N/A; Package Description: 4-Pin Surface Mount Device, Body 2.9 x 3.5 mm, Pitch 1.45 mm; Family: EVPAA; Contact Material: N/A; Mounting: SurfaceMount,J-Bend; Datasheet Version: 04/2016; Housing Material: N/A; Product Weight: N/A; RoHS: Yes; Mechanical Life: N/A; Minimum Insulation Resistance: 100MOhm; Operating Temperature: -40to85C; Mounting Technology: SurfaceMount; HTS: 8507204000; Dimension: 4.3x2.9x1.7mm; Maximum Contact Resistance: 100mOhm; Base Material: N/A; Seal Location: N/A; Supplier Standard Pack: 5,000; Supplier: PanasonicIndustrialDevices; Datasheet URL: https://industrial.panasonic.com/cdbs/www-data/pdf/ATV0000/ATV0000C1.pdf; Packaging: EmbossedTapeandReel; Manufacturer URL: http://www.panasonic.com/; Seal Description: N/A; Contact Plating: N/A; ECCN: EAR99; Package Reference: EVPAA; Type: LightTouch; Part No: EVP-AA002K; Supplier Part Number: P13347SDKR-ND; Manufacturer Part Number: EVP-AA002K; Category: Tactile Switches; Stock: 749; Pricing: 1=0.8, 10=0.774, 25=0.744, 100=0.6459, 250=0.5894, 500=0.54772, 1000=0.49116, 2500=0.46139 (USD); ComponentLink1URL: https://datasheet.ciiva.com/24076/atk0000pe184-69004-24076293.pdf?src-supplier=Mouser; ComponentLink1Description: https://datasheet.ciiva.com/24076/atk0000pe184-69004-24076293.pdf?src-supplier=Mouser; ComponentLink2URL: https://datasheet.ciiva.com/2899/atk0000ce26-2899990.pdf?src-supplier=Digikey; ComponentLink2Description: https://datasheet.ciiva.com/2899/atk0000ce26-2899990.pdf?src-supplier=Digikey; ComponentLink3URL: https://datasheet.ciiva.com/2899/atk0000ce26-2899991.pdf?src-supplier=Digikey; ComponentLink3Description: https://datasheet.ciiva.com/2899/atk0000ce26-2899991.pdf?src-supplier=Digikey; ComponentLink4URL: https://datasheet.ciiva.com/2899/atk0000ce26-2899992.pdf?src-supplier=Digikey; ComponentLink4Description: https://datasheet.ciiva.com/2899/atk0000ce26-2899992.pdf?src-supplier=Digikey
footprint PNSC-EVPAA_V (SMD, 4-Leads, Body 2.9x3.5mm, Pitch 1.45mm)
pins: 1 A, 2 B, 3 A', 4 B'

## CMP-2000-07593-1
designator LED?, comment Red
LED Red, 75 mW, 54 mcd, -55 to 85 degC, 2-Pin SMD, RoHS, Tape and Reel; Manufacturer: Lite-On; Manufacturer Part Number: 859-LTST-C170KRKT; Lens Transparency: Clear; Number of Elements: 1; Power Rating: 75mW; Luminous Intensity: 54mcd; Viewing Angle: 130degrees; Forward Current: 30mA; Wavelength: 639nm; Lens Style: Rectangular; Case\/Package: 0805; Test Current: 20mA; Dominant Wavelength: 631nm; Forward Voltage: 2V; Lens Colour: Colorless; Min Operating Temperature: -55degC; RoHSCompliant: True; Length: 3.2mm; Width: 1.25mm; Mount: SurfaceMount; Packaging: TapeandReel; Number of LEDs: 1; Radiation Hardening: No; Datasheet URL: http://optoelectronics.liteon.com/upload/download/DS-22-99-0150/LTST-C170KRKT.pdf; Datasheet Version: Rev. D, 11/2014; Case Code (Metric): 2012; Height: 1.1mm; Number of Pins: 2; Package Description: 2-Pin Surface Mount Device, Body 2 x 1.25 mm; Manufacturer URL: http://www.us.liteon.com/; Lead Free: LeadFree; Illumination Colour: Red; Colour: Red; Case Code (Imperial): 0805; Max Operating Temperature: 85degC; Power Dissipation: 75mW; Mounting Technology: SurfaceMount; Package Reference: C170KRKT; Package Quantity: 1; Depth: 1.6mm; Supplier 1: Mouser
footprint LTST-C170KRKT_V (SMD, 2-Leads, Body 2x1.25mm)
pins: 1 K, 2 A

## CMP-2001-00227-1
designator R?, comment 5k36
Resistor 5k36 0805; Manufacturer: Panasonic; Manufacturer Part Number: ERJ-6ENF5361V; Supplier 1: Farnell; Supplier Part Number 1: 2303627
footprint RESC2013X70X40LL20T20 (Chip Resistor, 2-Leads, Body 2.00x1.25mm, IPC High Density)
footprint RESC2013X70X40ML20T20 (Chip Resistor, 2-Leads, Body 2.00x1.25mm, IPC Low Density)
footprint RESC2013X70X40NL20T20 (Chip Resistor, 2-Leads, Body 2.00x1.25mm, IPC Medium Density)
pins: 1, 2
1 alternate drawing of the same symbol

## CMP-2001-00253-1
designator R?, comment 60.4R
Resistor 60R4 0805; Manufacturer: Panasonic; Part Number: ERJ-6ENF60R4V; Tolerance: 1%; Value: 60.4 Ohm; Temperature Coefficient: 100ppm/°C; Max Power Dissipation: 125mW; Voltage Rating (DC): 150V; Supplier 1: Digi-Key; Supplier Part Number 1: P60.4CCT-ND; Manufacturer Part Number: ERJ-6ENF60R4V; RoHS: Yes; Category: Chip SMD Resistors; Stock 1: 51492; Pricing 1: 1=0.10000, 10=0.06500, 100=0.02500, 1000=0.01100, 2500=0.00950 (USD); Mount: Surface Mount; Case/Package: 0805; Case Code (Metric): 2012; Case Code (Imperial): 0805; Contact Plating: Tin; Min Operating Temperature: -55°C; Max Operating Temperature: 155°C; Packaging: Tape and Reel; Resistor Type: Thick Film; Number of Terminations: 2; Package Quantity: 1; Features: Automotive AEC-Q200; Power Rating: 125mW; Voltage Rating: 150V; Termination: SMD/SMT; Length: 2mm; Width: 0.049inch; Height: 0.6mm; Depth: 1.25mm; Lead Free: Lead Free; Military Standard: Not; REACH SVHC: Yes; ComponentLink1URL: https://datasheet.ciiva.com/7853/aoa0000ce2-7853733.pdf?src-supplier=Element14; ComponentLink1Description: https://datasheet.ciiva.com/7853/aoa0000ce2-7853733.pdf?src-supplier=Element14; ComponentLink2URL: https://datasheet.ciiva.com/16759/70260748-16759848.pdf?src-supplier=Allied+Electronics; ComponentLink2Description: https://datasheet.ciiva.com/16759/70260748-16759848.pdf?src-supplier=Allied+Electronics; ComponentLink3URL: https://datasheet.ciiva.com/24071/aoa0000ce2-24071273.pdf?src-supplier=Mouser; ComponentLink3Description: https://datasheet.ciiva.com/24071/aoa0000ce2-24071273.pdf?src-supplier=Mouser; ComponentLink4URL: https://datasheet.ciiva.com/46373/1678782-46373434.pdf?src-supplier=Element14; ComponentLink4Description: https://datasheet.ciiva.com/46373/1678782-46373434.pdf?src-supplier=Element14; ComponentLink5URL: https://datasheet.ciiva.com/46373/1678782-46373435.pdf?src-supplier=Element14; ComponentLink5Description: https://datasheet.ciiva.com/46373/1678782-46373435.pdf?src-supplier=Element14; ComponentLink6URL: https://datasheet.ciiva.com/28594/1694929-28594750.pdf?src-supplier=Element14; ComponentLink6Description: https://datasheet.ciiva.com/28594/1694929-28594750.pdf?src-supplier=Element14; ComponentLink7URL: https://datasheet.ciiva.com/30231/aoa0000ce2-30231647.pdf?src-supplier=Onlinecomponents.com; ComponentLink7Description: https://datasheet.ciiva.com/30231/aoa0000ce2-30231647.pdf?src-supplier=Onlinecomponents.com
footprint RESC2013X70X40ML20T20 (Chip Resistor, 2-Leads, Body 2.00x1.25mm, IPC Low Density)
footprint RESC2013X70X40LL20T20 (Chip Resistor, 2-Leads, Body 2.00x1.25mm, IPC High Density)
footprint RESC2013X70X40NL20T20 (Chip Resistor, 2-Leads, Body 2.00x1.25mm, IPC Medium Density)
pins: 1, 2
1 alternate drawing of the same symbol

## CMP-2001-00337-1
designator R?, comment 10k
Resistor 10k 0805; Manufacturer: Panasonic; Manufacturer Part Number: ERJ-6GEYJ103V; Supplier 1: Mouser; Supplier Part Number 1: 667-ERJ-6GEYJ103V
footprint RESC2013X70X40LL20T20 (Chip Resistor, 2-Leads, Body 2.00x1.25mm, IPC High Density)
footprint RESC2013X70X40NL20T20 (Chip Resistor, 2-Leads, Body 2.00x1.25mm, IPC Medium Density)
footprint RESC2013X70X40ML20T20 (Chip Resistor, 2-Leads, Body 2.00x1.25mm, IPC Low Density)
pins: 1, 2
1 alternate drawing of the same symbol

## CMP-2001-00338-1
designator R?, comment 100k
Resistor 100k 0805; Manufacturer: Panasonic; Manufacturer Part Number: ERJ-6GEYJ104V; Supplier 1: Mouser; Supplier Part Number 1: 667-ERJ-6GEYJ104V
footprint RESC2013X70X40NL20T20 (Chip Resistor, 2-Leads, Body 2.00x1.25mm, IPC Medium Density)
footprint RESC2013X70X40ML20T20 (Chip Resistor, 2-Leads, Body 2.00x1.25mm, IPC Low Density)
footprint RESC2013X70X40LL20T20 (Chip Resistor, 2-Leads, Body 2.00x1.25mm, IPC High Density)
pins: 1, 2
1 alternate drawing of the same symbol

## CMP-2001-00442-1
designator R?, comment 68k
Resistor 68k 0805; Manufacturer: Panasonic; Manufacturer Part Number: ERJ-6GEYJ683V; Supplier 1: Mouser; Supplier Part Number 1: 667-ERJ-6GEYJ683V
footprint RESC2013X70X40LL20T20 (Chip Resistor, 2-Leads, Body 2.00x1.25mm, IPC High Density)
footprint RESC2013X70X40NL20T20 (Chip Resistor, 2-Leads, Body 2.00x1.25mm, IPC Medium Density)
footprint RESC2013X70X40ML20T20 (Chip Resistor, 2-Leads, Body 2.00x1.25mm, IPC Low Density)
pins: 1, 2
1 alternate drawing of the same symbol

## CMP-2001-00613-1
designator R?, comment 2k2
Resistor 2k2 0603; Manufacturer: Panasonic; Manufacturer Part Number: ERA6AEB222V; Supplier 1: Mouser; Supplier Part Number 1: 603-RC0603FR-072K2L
footprint RESC2013X60X40LL20T25 (Chip Resistor, 2-Leads, Body 2.00x1.25mm, IPC High Density)
footprint RESC2013X60X40ML20T25 (Chip Resistor, 2-Leads, Body 2.00x1.25mm, IPC Low Density)
footprint RESC2013X60X40NL20T25 (Chip Resistor, 2-Leads, Body 2.00x1.25mm, IPC Medium Density)
pins: 1, 2
1 alternate drawing of the same symbol

## CMP-2001-00665-1
designator R?, comment 75R
Resistor 75R 0805; Part Number: ERA6AEB750V; Manufacturer Part Number: ERA6AEB750V; Supplier 1: Mouser; Supplier Part Number 1: 667-ERA-6AEB750V
footprint RESC2013X60X40NL20T25 (Chip Resistor, 2-Leads, Body 2.00x1.25mm, IPC Medium Density)
footprint RESC2013X60X40ML20T25 (Chip Resistor, 2-Leads, Body 2.00x1.25mm, IPC Low Density)
footprint RESC2013X60X40LL20T25 (Chip Resistor, 2-Leads, Body 2.00x1.25mm, IPC High Density)
pins: 1, 2
1 alternate drawing of the same symbol

## CMP-2001-01271-1
designator R?, comment 7k15
Resistor 7k15 0805; Part Number: RC0805FR-077K15L; Manufacturer Part Number: RC0805FR-077K15L; Supplier 1: Mouser; Supplier Part Number 1: 603-RC0805FR-077K15L
footprint RESC2013X60X35ML10T20 (Chip Resistor, 2-Leads, Body 2.00x1.25mm, IPC Low Density)
footprint RESC2013X60X35LL10T20 (Chip Resistor, 2-Leads, Body 2.00x1.25mm, IPC High Density)
footprint RESC2013X60X35NL10T20 (Chip Resistor, 2-Leads, Body 2.00x1.25mm, IPC Medium Density)
pins: 1, 2
1 alternate drawing of the same symbol

## CMP-2001-01312-1
designator R?, comment 95k3
Resistor 95k3 0805; Manufacturer: Yageo; Manufacturer Part Number: RC0805FR-0795K3L; Supplier 1: Future Electronics; Supplier Part Number 1: 8486029
footprint RESC2013X60X35NL10T20 (Chip Resistor, 2-Leads, Body 2.00x1.25mm, IPC Medium Density)
footprint RESC2013X60X35ML10T20 (Chip Resistor, 2-Leads, Body 2.00x1.25mm, IPC Low Density)
footprint RESC2013X60X35LL10T20 (Chip Resistor, 2-Leads, Body 2.00x1.25mm, IPC High Density)
pins: 1, 2
1 alternate drawing of the same symbol

## CMP-2002-00186-1
designator R?, comment 6k49
Resistor 6k49 0402 1%; Manufacturer: Vishay Dale; Manufacturer Part Number: CRCW04026K49FKED; Supplier 1: Mouser; Supplier Part Number 1: 71-CRCW0402-6.49K-E3
footprint RESC1005X40X25NL05T05 (Chip Resistor, 2-Leads, Body 1.00x0.50mm, IPC Medium Density)
footprint RESC1005X40X25ML05T05 (Chip Resistor, 2-Leads, Body 1.00x0.50mm, IPC Low Density)
footprint RESC1005X40X25LL05T05 (Chip Resistor, 2-Leads, Body 1.00x0.50mm, IPC High Density)
pins: 1, 2
1 alternate drawing of the same symbol

## CMP-2002-00433-1
designator R?, comment 10k
Resistor 10k 0402; Manufacturer Part Number: ERJ-2GEJ103X; Manufacturer: Panasonic; Supplier 1: Mouser; Supplier Part Number 1: 667-ERJ-2GEJ103X
footprint RESC1005X40X25ML05T05 (Chip Resistor, 2-Leads, Body 1.00x0.50mm, IPC Low Density)
footprint RESC1005X40X25NL05T05 (Chip Resistor, 2-Leads, Body 1.00x0.50mm, IPC Medium Density)
footprint RESC1005X40X25LL05T05 (Chip Resistor, 2-Leads, Body 1.00x0.50mm, IPC High Density)
pins: 1, 2
1 alternate drawing of the same symbol